# Altium schematic symbol library Schlib1.SchLib: 9 symbols
Pins are listed as number, name and electrical type; pins without a type are passive.

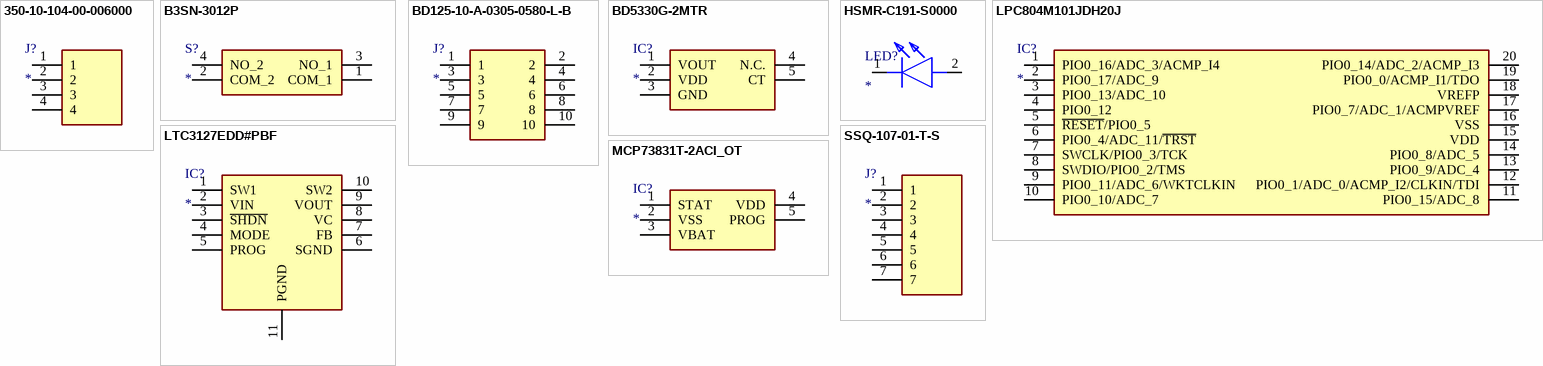
[diagram p0: symbols 350-10-104-00-006000 to SSQ-107-01-T-S]

## 350-10-104-00-006000
designator J?
Connector; Manufacturer_Name: Mill-Max; Manufacturer_Part_Number: 350-10-104-00-006000; Datasheet Link: https://www.mouser.com/datasheet/2/273/MMMCS22968_1-2552356.pdf; Height: 6.401mm
footprint HDRV4W46P0X254_1X4_1016X254X640P
pins: 1, 2, 3, 4

## B3SN-3012P
designator S?
Switch; Manufacturer_Name: Omron Electronics; Manufacturer_Part_Number: B3SN-3012P; Datasheet Link: https://componentsearchengine.com/Datasheets/2/B3SN-3012P.pdf; Height: 3.4mm; Mouser Part Number: 653-B3SN-3012P; Mouser Price/Stock: https://www.mouser.co.uk/ProductDetail/Omron-Electronics/B3SN-3012P?qs=nNiD76Ca0%252BuGaCx%252BnRL5KQ%3D%3D; Arrow Part Number: B3SN-3012P; Arrow Price/Stock: https://www.arrow.com/en/products/b3sn3012p/omron?region=nac
footprint B3SN3012P
pins: 1 COM_1, 2 COM_2, 3 NO_1, 4 NO_2

## BD125-10-A-0305-0580-L-B
designator J?
Connector; Manufacturer_Name: GCT (GLOBAL CONNECTOR TECHNOLOGY); Manufacturer_Part_Number: BD125-10-A-0305-0580-L-B; Datasheet Link: https://gct.co/connector/bd125; Height: 6.37mm; Mouser Part Number: 640-BD12510A305580LB; Mouser Price/Stock: https://www.mouser.co.uk/ProductDetail/GCT/BD125-10-A-0305-0580-L-B?qs=amGC7iS6iy%252BPUE%252B5wV8wFA%3D%3D
footprint BD12510A03050580LB
pins: 1, 2, 3, 4, 5, 6, 7, 8, 9, 10

## BD5330G-2MTR
designator IC?
Integrated Circuit; Manufacturer_Name: ROHM Semiconductor; Manufacturer_Part_Number: BD5330G-2MTR; Datasheet Link: https://fscdn.rohm.com/en/products/databook/datasheet/ic/power/voltage_detector/bd5xxxg-2m-e.pdf; Height: 1.25mm; Mouser Part Number: 755-BD5330G-2MTR; Mouser Price/Stock: https://www.mouser.co.uk/ProductDetail/ROHM-Semiconductor/BD5330G-2MTR?qs=YCa%2FAAYMW01zqS1e%252B79Sag%3D%3D
footprint SOT95P280X125-5N
pins: 1 VOUT, 2 VDD, 3 GND, 4 N.C., 5 CT

## HSMR-C191-S0000
designator LED?
LED; Manufacturer_Name: Avago Technologies; Manufacturer_Part_Number: HSMR-C191-S0000; Datasheet Link: https://docs.broadcom.com/docs/HSMR-C191-S0000-DS100; Height: 0.7mm; Mouser Part Number: 630-HSMR-C191-S0000; Mouser Price/Stock: https://www.mouser.co.uk/ProductDetail/Broadcom-Avago/HSMR-C191-S0000?qs=tMOYG%252Bw4%252BLxppTo9IXYduQ%3D%3D
footprint LEDC1608X70N
pins: 1 K, 2 A

## LPC804M101JDH20J
designator IC?
Integrated Circuit; Manufacturer_Name: NXP; Manufacturer_Part_Number: LPC804M101JDH20J; Datasheet Link: https://www.nxp.com/docs/en/nxp/data-sheets/LPC804_DS.pdf; Height: 1.1mm; Mouser Part Number: 771-LPC804M101JDH20J; Mouser Price/Stock: https://www.mouser.co.uk/ProductDetail/NXP-Semiconductors/LPC804M101JDH20J?qs=W0yvOO0ixfFx8%2FU1a3Isyw%3D%3D
footprint SOP65P640X110-20N
pins: 1 PIO0_16/ADC_3/ACMP_I4, 2 PIO0_17/ADC_9, 3 PIO0_13/ADC_10, 4 PIO0_12, 5 ~{RESET}/PIO0_5, 6 PIO0_4/ADC_11/~{TRST}, 7 SWCLK/PIO0_3/TCK, 8 SWDIO/PIO0_2/TMS, 9 PIO0_11/ADC_6/WKTCLKIN, 10 PIO0_10/ADC_7, 11 PIO0_15/ADC_8, 12 PIO0_1/ADC_0/ACMP_I2/CLKIN/TDI, 13 PIO0_9/ADC_4, 14 PIO0_8/ADC_5, 15 VDD, 16 VSS, 17 PIO0_7/ADC_1/ACMPVREF, 18 VREFP, 19 PIO0_0/ACMP_I1/TDO, 20 PIO0_14/ADC_2/ACMP_I3

## LTC3127EDD#PBF
designator IC?
Integrated Circuit; Manufacturer_Name: Analog Devices; Manufacturer_Part_Number: LTC3127EDD#PBF; Datasheet Link: https://www.analog.com/media/en/technical-documentation/data-sheets/3127fa.pdf; Height: 0.8mm; Mouser Part Number: 584-LTC3127EDD#PBF; Mouser Price/Stock: https://www.mouser.co.uk/ProductDetail/Analog-Devices/LTC3127EDDPBF?qs=hVkxg5c3xu8G1q1ZX405dA%3D%3D; Arrow Part Number: LTC3127EDD#PBF; Arrow Price/Stock: https://www.arrow.com/en/products/ltc3127eddpbf/analog-devices
footprint SON50P300X300X80-11N-D
pins: 1 SW1, 2 VIN, 3 ~{SHDN}, 4 MODE, 5 PROG, 6 SGND, 7 FB, 8 VC, 9 VOUT, 10 SW2, 11 PGND

## MCP73831T-2ACI_OT
designator IC?
Integrated Circuit; Manufacturer_Name: Microchip; Manufacturer_Part_Number: MCP73831T-2ACI/OT; Datasheet Link: http://ww1.microchip.com/downloads/en/DeviceDoc/20001984g.pdf; Height: 1.45mm; Mouser Part Number: 579-MCP73831T-2ACIOT; Mouser Price/Stock: https://www.mouser.co.uk/ProductDetail/Microchip-Technology/MCP73831T-2ACI-OT?qs=yUQqVecv4qvbBQBGbHx0Mw%3D%3D; Arrow Part Number: MCP73831T-2ACI/OT; Arrow Price/Stock: https://www.arrow.com/en/products/mcp73831t-2aciot/microchip-technology?utm_currency=USD&region=nac
footprint SOT95P270X145-5N
pins: 1 STAT, 2 VSS, 3 VBAT, 4 VDD, 5 PROG

## SSQ-107-01-T-S
designator J?
Connector; Manufacturer_Name: SAMTEC; Manufacturer_Part_Number: SSQ-107-01-T-S; Datasheet Link: http://suddendocs.samtec.com/prints/ssq-1xx-xx-xxx-x-xx-xxx-xx-x-mkt.pdf; Height: 8.51mm; Mouser Part Number: 200-SSQ10701TS; Mouser Price/Stock: https://www.mouser.co.uk/ProductDetail/Samtec/SSQ-107-01-T-S?qs=rU5fayqh%252BE1xq4UrLxRC5Q%3D%3D
footprint RHDR7W64P254_1X7_1829X241X851P
pins: 1, 2, 3, 4, 5, 6, 7